# Altium footprint library LAIL-PZ2.54-4P-L.PcbLib: 1 footprints
Each footprint in its own frame and in the unit in brackets; x right, y up, seen from the top. Pads: shape width x height; smd on the part's side, far side on the other; paste and mask are expansions set on the pad; w line width, h text height; cw(c..) or ccw(c..) is an arc to the next point about the centre after c.
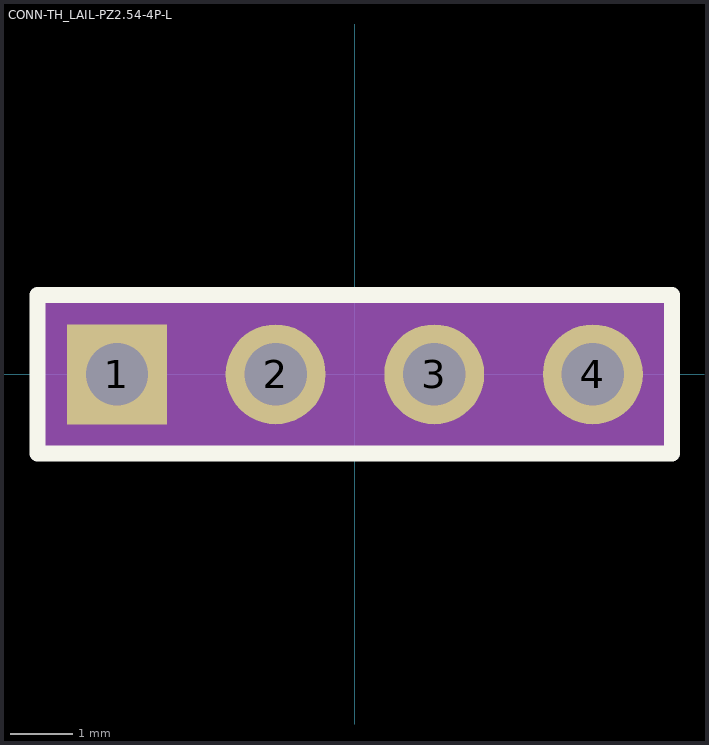
[diagram p0: the footprint, top view; thin cyan lines are the x and y axes]

## CONN-TH_LAIL-PZ2.54-4P-L [mm]
pads (4):
  rect 1.6x1.6 hole 1 paste-2539.97 mask+0.051: 1(-3.81,0)
  round 1.6 hole 1 paste-2539.97 mask+0.051: 2(-1.27,0) 3(1.27,0) 4(3.81,0)
Top Overlay:
  lines w0.254: -5.08,-1.27 5.08,-1.27 5.08,1.27 -5.08,1.27 -5.08,-1.27
Mechanical 9:
  region: -5.08,-1.25 -5.08,1.25 5.08,1.25 5.08,-1.25
Mechanical 11:
  region: -5.05,1.25 -5.05,1.247 -5.051,1.241 -5.053,1.236 -5.057,1.231 -5.061,1.227 -5.066,1.223 -5.071,1.221 -5.077,1.22 -5.083,1.22 -5.089,1.221 -5.094,1.223 -5.099,1.227 -5.103,1.231 -5.106,1.236 -5.109,1.241 -5.11,1.247 -5.11,1.25 -5.11,1.253 -5.109,1.259 -5.106,1.264 -5.103,1.269 -5.099,1.273 -5.094,1.277 -5.089,1.279 -5.083,1.28 -5.077,1.28 -5.071,1.279 -5.066,1.277 -5.061,1.273 -5.057,1.269 -5.053,1.264 -5.051,1.259 -5.05,1.253 -5.05,1.25
Mechanical 12:
  region: -4.13,0.32 -3.49,0.32 -3.49,-0.32 -4.13,-0.32
  region: -1.59,0.32 -0.95,0.32 -0.95,-0.32 -1.59,-0.32
  region: 0.95,0.32 1.59,0.32 1.59,-0.32 0.95,-0.32
  region: 3.49,0.32 4.13,0.32 4.13,-0.32 3.49,-0.32